# Altium footprint library pcb_mp1584.PcbLib: 1 footprints
Each footprint in its own frame and in the unit in brackets; x right, y up, seen from the top. Pads: shape width x height; smd on the part's side, far side on the other; paste and mask are expansions set on the pad; w line width, h text height; cw(c..) or ccw(c..) is an arc to the next point about the centre after c.
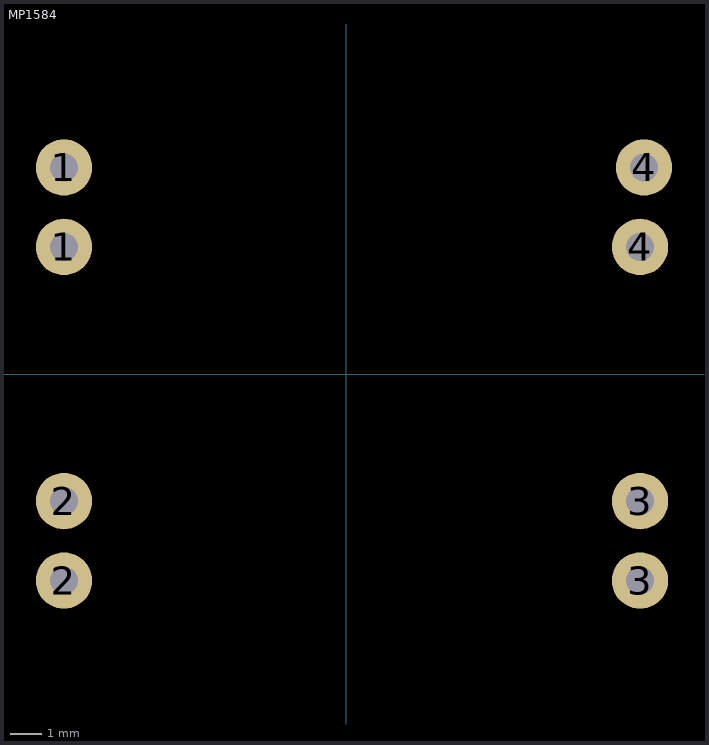
[diagram p0: the footprint, top view; thin cyan lines are the x and y axes]

## MP1584 [mm]
pads (8):
  round 1.8 hole 0.9: 1(-9.017,4.064) 1(-9.017,6.604) 2(-9.017,-6.604) 2(-9.017,-4.064) 3(9.398,-6.604) 3(9.398,-4.064) 4(9.398,4.064) 4(9.525,6.604)
3D body "D-SUN_dcdc_step_down_SIMPLE.step": height 4.1, standoff 0, extent -10.796,-8.4 11.304,8.4